# Altium footprint library LimeMicroAltiumLib.PcbLib: 876 footprints (part 35 of 57)
Each footprint in its own frame and in the unit in brackets; x right, y up, seen from the top. Pads: shape width x height; smd on the part's side, far side on the other; paste and mask are expansions set on the pad; w line width, h text height; cw(c..) or ccw(c..) is an arc to the next point about the centre after c.
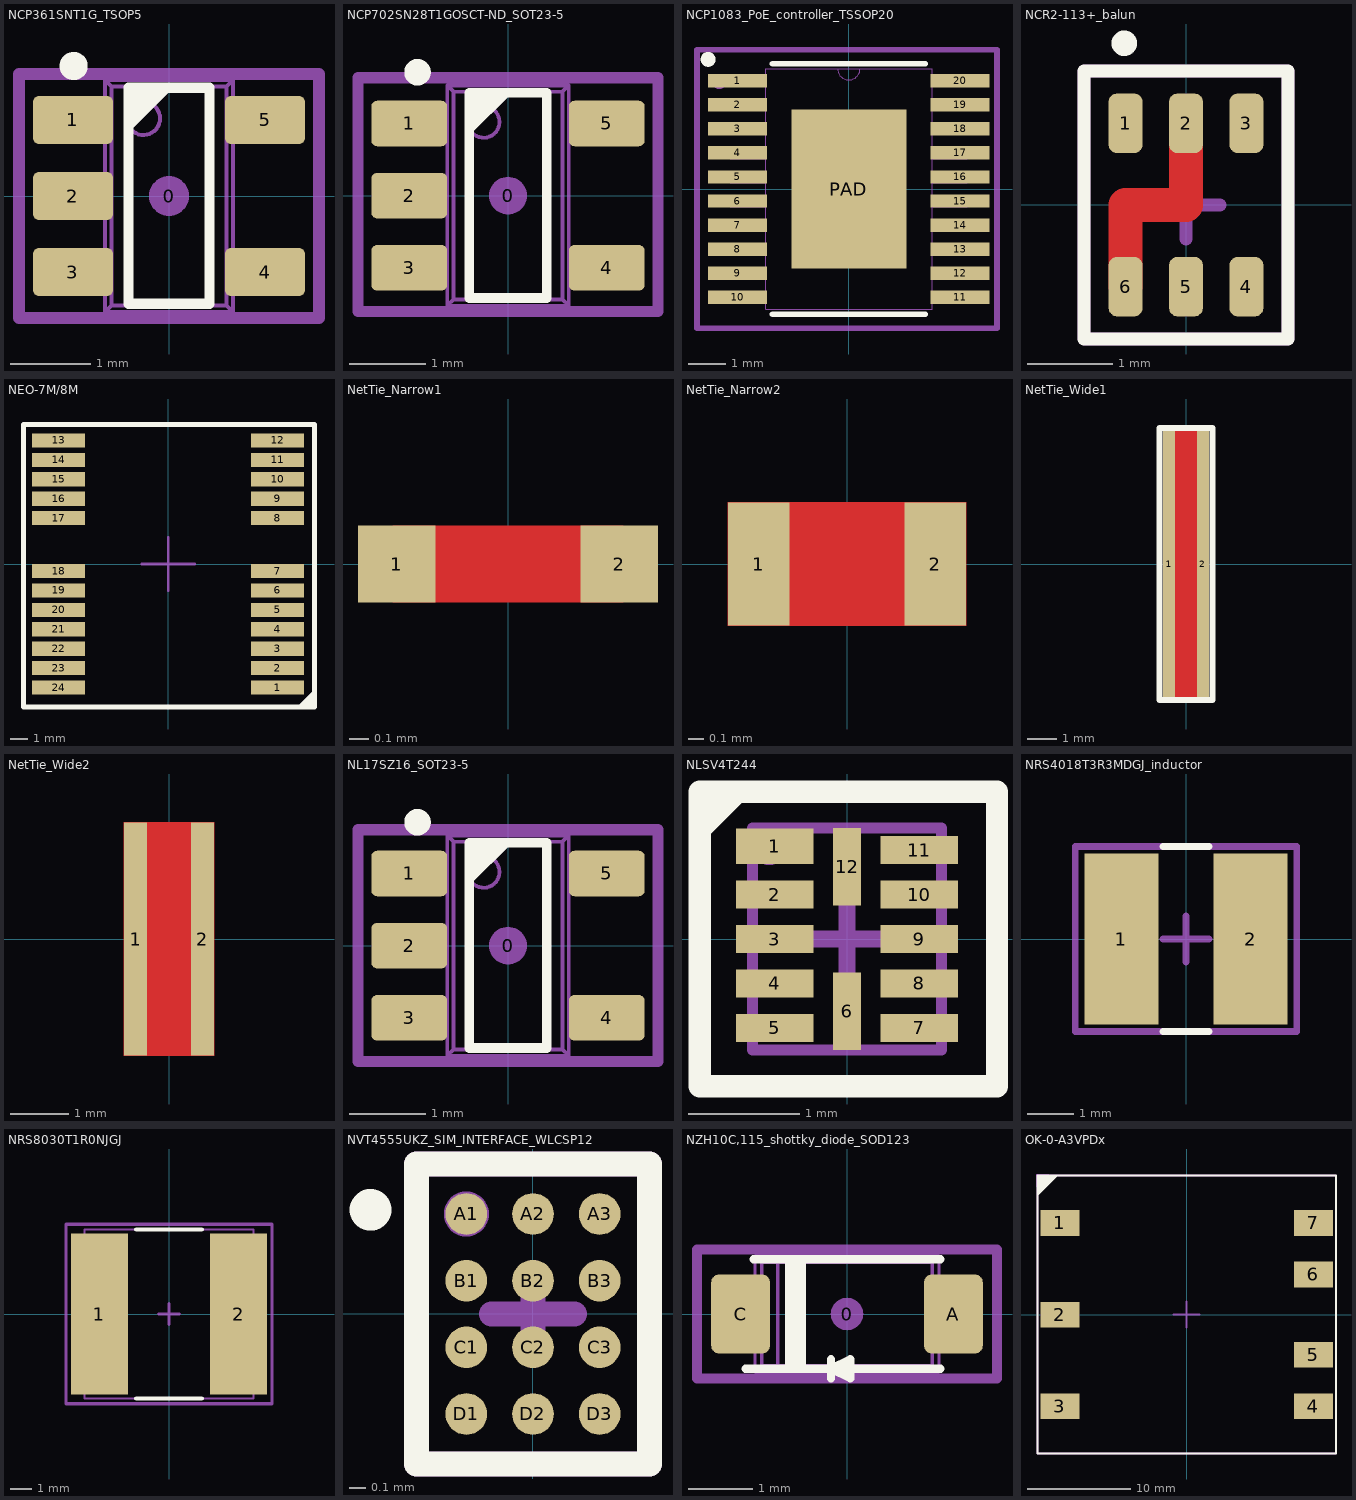
[diagram p34: the footprints below, top view; thin cyan lines are the x and y axes]

## NCP361SNT1G_TSOP5 [mm]
height 1.6
pads (6):
  round 0.5 on Mech15: 0(0,0)
  rrect25% 1x0.6 smd: 1(-1.2,0.95) 2(-1.2,0) 3(-1.2,-0.95) 4(1.2,-0.95) 5(1.2,0.95)
Top Overlay:
  circle w0.2: c-1.191,1.625 r0.075
  region: -0.508,1.353 0.053,1.353 -0.508,0.792
  lines w0.127: -0.508,-1.347 0.508,-1.347 0.508,1.353 -0.508,1.353 -0.508,-1.347
Mechanical 13:
  circle w0.05: c-0.32,0.97 r0.208
  lines w0.05: -1.191,-1.15 -1.191,-0.75 ; -1.191,-0.2 -1.191,0.2 ; -1.191,0.75 -1.191,1.15 ; -1.1,-1.15 -1.1,-0.75 ; -1.1,-0.2 -1.1,0.2 ; -1.1,0.75 -1.1,1.15 ; -1.094,-1.15 -1.094,-0.75 ; -1.094,-0.2 -1.094,0.2 ; -1.094,0.75 -1.094,1.15 ; -0.844,-1.15 -0.844,-0.75 ; -0.844,-0.2 -0.844,0.2 ; -0.844,0.75 -0.844,1.15 ; -0.8,-1.15 -1.4,-1.15 -1.4,-0.75 -0.8,-0.75 ; -0.8,-0.2 -1.4,-0.2 -1.4,0.2 -0.8,0.2 ; -0.8,0.75 -1.4,0.75 -1.4,1.15 -0.8,1.15 ; 0.8,-1.15 1.4,-1.15 1.4,-0.75 0.8,-0.75 ; 0.8,0.75 1.4,0.75 1.4,1.15 0.8,1.15 ; 0.844,-1.15 0.844,-0.75 ; 0.844,0.75 0.844,1.15 ; 1.094,-1.15 1.094,-0.75 ; 1.094,0.75 1.094,1.15 ; 1.1,-1.15 1.1,-0.75 ; 1.1,0.75 1.1,1.15 ; 1.191,-1.15 1.191,-0.75 ; 1.191,0.75 1.191,1.15 ; -0.8,-1.45 0.8,-1.45 ; -0.8,-1.45 -0.719,-1.369 ; -0.8,-1.45 -0.8,1.45 ; -0.8,1.45 0.8,1.45 ; -0.8,1.45 -0.719,1.369 ; -0.719,-1.369 -0.719,1.369 ; -0.719,-1.369 0.719,-1.369 ; -0.719,1.369 0.719,1.369 ; 0.719,-1.369 0.719,1.369 ; 0.719,-1.369 0.8,-1.45 ; 0.719,1.369 0.8,1.45 ; 0.8,-1.45 0.8,1.45
Mechanical 15:
  circle w0.35: c-1.2,0.95 r0.079
  lines w0.15: -1.875,-1.525 1.875,-1.525 1.875,1.525 -1.875,1.525 -1.875,-1.525
  text ".Designator" at 0,0 h0.55
3D body "SOT23-5.STEP": height 1.44, standoff -0.01, extent -1.4,-1.45 1.4,1.45

## NCP702SN28T1GOSCT-ND_SOT23-5 [mm]
height 1.6
pads (6):
  round 0.5 on Mech15: 0(0,0)
  rrect25% 1x0.6 smd: 1(-1.3,0.95) 2(-1.3,0) 3(-1.3,-0.95) 4(1.3,-0.95) 5(1.3,0.95)
Top Overlay:
  circle w0.2: c-1.191,1.625 r0.075
  region: -0.508,1.353 0.053,1.353 -0.508,0.792
  lines w0.127: -0.508,-1.347 -0.508,1.353 0.508,1.353 0.508,-1.347 -0.508,-1.347
Mechanical 13:
  circle w0.05: c-0.32,0.97 r0.208
  lines w0.05: -1.191,-1.15 -1.191,-0.75 ; -1.191,-0.2 -1.191,0.2 ; -1.191,0.75 -1.191,1.15 ; -1.1,-1.15 -1.1,-0.75 ; -1.1,-0.2 -1.1,0.2 ; -1.1,0.75 -1.1,1.15 ; -1.094,-1.15 -1.094,-0.75 ; -1.094,-0.2 -1.094,0.2 ; -1.094,0.75 -1.094,1.15 ; -0.844,-1.15 -0.844,-0.75 ; -0.844,-0.2 -0.844,0.2 ; -0.844,0.75 -0.844,1.15 ; -0.8,-1.15 -1.4,-1.15 -1.4,-0.75 -0.8,-0.75 ; -0.8,-0.2 -1.4,-0.2 -1.4,0.2 -0.8,0.2 ; -0.8,0.75 -1.4,0.75 -1.4,1.15 -0.8,1.15 ; 0.8,-1.15 1.4,-1.15 1.4,-0.75 0.8,-0.75 ; 0.8,0.75 1.4,0.75 1.4,1.15 0.8,1.15 ; 0.844,-1.15 0.844,-0.75 ; 0.844,0.75 0.844,1.15 ; 1.094,-1.15 1.094,-0.75 ; 1.094,0.75 1.094,1.15 ; 1.1,-1.15 1.1,-0.75 ; 1.1,0.75 1.1,1.15 ; 1.191,-1.15 1.191,-0.75 ; 1.191,0.75 1.191,1.15 ; -0.8,-1.45 -0.8,1.45 ; -0.8,-1.45 -0.719,-1.369 ; -0.8,-1.45 0.8,-1.45 ; -0.8,1.45 -0.719,1.369 ; -0.8,1.45 0.8,1.45 ; -0.719,-1.369 0.719,-1.369 ; -0.719,-1.369 -0.719,1.369 ; -0.719,1.369 0.719,1.369 ; 0.719,-1.369 0.8,-1.45 ; 0.719,-1.369 0.719,1.369 ; 0.719,1.369 0.8,1.45 ; 0.8,-1.45 0.8,1.45
Mechanical 15:
  circle w0.35: c-1.375,0.95 r0.025
  lines w0.15: -1.975,-1.525 -1.975,1.55 1.975,1.55 1.975,-1.525 -1.975,-1.525
  text ".Designator" at 0,0 h0.55
3D body "SOT23-5.STEP": height 1.44, standoff -0.01, extent -1.4,-1.45 1.4,1.45

## NCP1083_PoE_controller_TSSOP20 [mm]
pads (21):
  rect 1.6x0.36 smd mask+0.05: 1(-3.004,2.925) 2(-3.004,2.275) 3(-3.004,1.625) 4(-3.004,0.975) 5(-3.004,0.325) 6(-3.004,-0.325) 7(-3.004,-0.975) 8(-3.004,-1.625) 9(-3.004,-2.275) 10(-3.004,-2.925) 11(3.004,-2.925) 12(3.004,-2.275) 13(3.004,-1.625) 14(3.004,-0.975) 15(3.004,-0.325) 16(3.004,0.325) 17(3.004,0.975) 18(3.004,1.625) 19(3.004,2.275) 20(3.004,2.925)
  rect 3.1x4.3 smd mask+0.05: PAD(0,0)
Top Overlay:
  circle w0.2: c-3.8,3.5 r0.1
  lines w0.152: -2.061,-3.378 2.061,-3.378 ; -2.061,3.378 2.061,3.378
Mechanical 13:
  lines w0: -0.305,3.251 ccw(c0,3.251) 0.305,3.251
  lines w0.025: -3.2,-3.077 -2.248,-3.077 -2.248,-2.773 -3.2,-2.773 -3.2,-3.077 ; -3.2,-2.427 -2.248,-2.427 -2.248,-2.123 -3.2,-2.123 -3.2,-2.427 ; -3.2,-1.777 -2.248,-1.777 -2.248,-1.473 -3.2,-1.473 -3.2,-1.777 ; -3.2,-1.127 -2.248,-1.127 -2.248,-0.823 -3.2,-0.823 -3.2,-1.127 ; -3.2,-0.477 -2.248,-0.477 -2.248,-0.173 -3.2,-0.173 -3.2,-0.477 ; -3.2,0.173 -2.248,0.173 -2.248,0.477 -3.2,0.477 -3.2,0.173 ; -3.2,0.823 -2.248,0.823 -2.248,1.127 -3.2,1.127 -3.2,0.823 ; -3.2,1.473 -2.248,1.473 -2.248,1.777 -3.2,1.777 -3.2,1.473 ; -3.2,2.123 -2.248,2.123 -2.248,2.427 -3.2,2.427 -3.2,2.123 ; -3.2,2.773 -2.248,2.773 -2.248,3.077 -3.2,3.077 -3.2,2.773 ; -2.248,-3.251 -2.248,3.251 2.248,3.251 2.248,-3.251 -2.248,-3.251 ; 2.248,-3.077 3.2,-3.077 3.2,-2.773 2.248,-2.773 2.248,-3.077 ; 2.248,-2.427 3.2,-2.427 3.2,-2.123 2.248,-2.123 2.248,-2.427 ; 2.248,-1.777 3.2,-1.777 3.2,-1.473 2.248,-1.473 2.248,-1.777 ; 2.248,-1.127 3.2,-1.127 3.2,-0.823 2.248,-0.823 2.248,-1.127 ; 2.248,-0.477 3.2,-0.477 3.2,-0.173 2.248,-0.173 2.248,-0.477 ; 2.248,0.173 3.2,0.173 3.2,0.477 2.248,0.477 2.248,0.173 ; 2.248,0.823 3.2,0.823 3.2,1.127 2.248,1.127 2.248,0.823 ; 2.248,1.473 3.2,1.473 3.2,1.777 2.248,1.777 2.248,1.473 ; 2.248,2.123 3.2,2.123 3.2,2.427 2.248,2.427 2.248,2.123 ; 2.248,2.773 3.2,2.773 3.2,3.077 2.248,3.077 2.248,2.773
Mechanical 15:
  circle w0.2: c-3.5,2.9 r0.1
  lines w0.15: -0.5,0 0.5,0 ; 0,-0.5 0,0.5 ; -4.1,-3.759 4,-3.759 4,3.759 -4.1,3.759 -4.1,-3.759
  text ".Designator" at 0,0 h0.55
3D body "TSSOP20_4P50X6P60_ONS.step": height 1.2, standoff 0, extent -3.2,-3.251 3.2,3.251

## NCR2-113+_balun [mm]
pads (6):
  rrect50% 0.4x0.7 smd mask+0.05: 1(-0.71,0.96) 2(0,0.96) 3(0.71,0.96) 4(0.71,-0.96) 5(0,-0.96) 6(-0.71,-0.96)
Top Layer:
  lines w0.4: -0.71,-0.96 -0.71,0 0,0 0,0.96
Top Overlay:
  circle w0.2: c-0.725,1.9 r0.05
  lines w0.15: -1.2,-1.575 -1.2,1.575 1.2,1.575 1.2,-1.575 -1.2,-1.575
Mechanical 15:
  lines w0.15: -0.4,0 0,0 ; 0,-0.4 0,0 ; 0,0.4 0,0 ; 0.4,0 0,0 ; -1.2,-1.575 -1.2,1.575 1.2,1.575 1.2,-1.575 -1.2,-1.575
  text ".Designator" at 0,0 h0.55
3D body: height 0.9, standoff 0, extent -1,-1.25 1,1.25
3D body: height 0.91, standoff 0, extent -0.775,0.75 -0.575,0.988

## NEO-7M/8M [mm]
pads (24):
  rect 3x0.8 smd: 1(6.2,-7) 2(6.2,-5.9) 3(6.2,-4.8) 4(6.2,-3.7) 5(6.2,-2.6) 6(6.2,-1.5) 7(6.2,-0.4) 8(6.2,2.6) 9(6.2,3.7) 10(6.2,4.8) 11(6.2,5.9) 12(6.2,7) 13(-6.2,7) 14(-6.2,5.9) 15(-6.2,4.8) 16(-6.2,3.7) 17(-6.2,2.6) 18(-6.2,-0.4) 19(-6.2,-1.5) 20(-6.2,-2.6) 21(-6.2,-3.7) 22(-6.2,-4.8) 23(-6.2,-5.9) 24(-6.2,-7)
Top Overlay:
  region: 7.5,-8.1 8.3,-7.3 8.3,-8.1
  lines w0.3: 7.5,-8.1 8.3,-7.3 ; -8.2,-8.1 -8.2,7.9 8.3,7.9 8.3,-8.1 -8.2,-8.1
Mechanical 15:
  circle w0.4: c6.2,-7 r0.1
  lines w0.15: -1.5,0 1.5,0 ; 0,-1.5 0,1.5 ; -8.2,-8.1 -8.2,7.9 8.3,7.9 8.3,-8.1 -8.2,-8.1
  text ".Designator" at 0,0 h0.55
3D body "NEO.STEP": height 2.33, standoff 0, extent -6.1,-8 6.1,8

## NetTie_Narrow1 [mm]
pads (2):
  rect 0.4x0.4 smd: 1(-0.575,0) 2(0.575,0)
Top Layer:
  lines w0.4: -0.575,0 0.575,0

## NetTie_Narrow2 [mm]
pads (2):
  rect 0.4x0.8 smd: 1(-0.575,0) 2(0.575,0)
Top Layer:
  region: -0.775,0.4 -0.775,-0.4 0.775,-0.4 0.775,0.4

## NetTie_Wide1 [mm]
pads (2):
  rect 0.4x9 smd: 1(-0.575,0) 2(0.575,0)
Top Layer:
  region: -0.775,4.5 -0.775,-4.5 0.775,-4.5 0.775,4.5
Top Overlay:
  lines w0.2: -0.9,-4.6 0.9,-4.6 0.9,4.6 -0.9,4.6 -0.9,-4.6

## NetTie_Wide2 [mm]
pads (2):
  rect 0.4x4 smd: 1(-0.575,0) 2(0.575,0)
Top Layer:
  region: -0.775,2 -0.775,-2 0.775,-2 0.775,2

## NL17SZ16_SOT23-5 [mm]
height 1.6
pads (6):
  round 0.5 on Mech15: 0(0,0)
  rrect25% 1x0.6 smd: 1(-1.3,0.95) 2(-1.3,0) 3(-1.3,-0.95) 4(1.3,-0.95) 5(1.3,0.95)
Top Overlay:
  circle w0.2: c-1.191,1.625 r0.075
  region: -0.508,1.353 0.053,1.353 -0.508,0.792
  lines w0.127: -0.508,-1.347 0.508,-1.347 0.508,1.353 -0.508,1.353 -0.508,-1.347
Mechanical 13:
  circle w0.05: c-0.32,0.97 r0.208
  lines w0.05: -1.191,-1.15 -1.191,-0.75 ; -1.191,-0.2 -1.191,0.2 ; -1.191,0.75 -1.191,1.15 ; -1.1,-1.15 -1.1,-0.75 ; -1.1,-0.2 -1.1,0.2 ; -1.1,0.75 -1.1,1.15 ; -1.094,-1.15 -1.094,-0.75 ; -1.094,-0.2 -1.094,0.2 ; -1.094,0.75 -1.094,1.15 ; -0.844,-1.15 -0.844,-0.75 ; -0.844,-0.2 -0.844,0.2 ; -0.844,0.75 -0.844,1.15 ; -0.8,-1.15 -1.4,-1.15 -1.4,-0.75 -0.8,-0.75 ; -0.8,-0.2 -1.4,-0.2 -1.4,0.2 -0.8,0.2 ; -0.8,0.75 -1.4,0.75 -1.4,1.15 -0.8,1.15 ; 0.8,-1.15 1.4,-1.15 1.4,-0.75 0.8,-0.75 ; 0.8,0.75 1.4,0.75 1.4,1.15 0.8,1.15 ; 0.844,-1.15 0.844,-0.75 ; 0.844,0.75 0.844,1.15 ; 1.094,-1.15 1.094,-0.75 ; 1.094,0.75 1.094,1.15 ; 1.1,-1.15 1.1,-0.75 ; 1.1,0.75 1.1,1.15 ; 1.191,-1.15 1.191,-0.75 ; 1.191,0.75 1.191,1.15 ; -0.8,-1.45 0.8,-1.45 ; -0.8,-1.45 -0.719,-1.369 ; -0.8,-1.45 -0.8,1.45 ; -0.8,1.45 0.8,1.45 ; -0.8,1.45 -0.719,1.369 ; -0.719,-1.369 -0.719,1.369 ; -0.719,-1.369 0.719,-1.369 ; -0.719,1.369 0.719,1.369 ; 0.719,-1.369 0.719,1.369 ; 0.719,-1.369 0.8,-1.45 ; 0.719,1.369 0.8,1.45 ; 0.8,-1.45 0.8,1.45
Mechanical 15:
  circle w0.35: c-1.3,0.875 r0.025
  lines w0.15: -1.975,-1.525 1.975,-1.525 1.975,1.525 -1.975,1.525 -1.975,-1.525
  text ".Designator" at 0,0 h0.55
3D body "SOT23-5.STEP": height 1.44, standoff -0.01, extent -1.4,-1.45 1.4,1.45

## NLSV4T244 [mm] "PQFN, 12-Leads, Body 1,70x2,00mm, Pitch 0,40mm, IPC Medium Density"
height 0.55
pads (12):
  rect 0.7x0.32 smd mask+0.05: 1(-0.65,0.835)
  rect 0.7x0.25 smd mask+0.05: 2(-0.65,0.4) 3(-0.65,0) 4(-0.65,-0.4) 5(-0.65,-0.8) 7(0.65,-0.8) 8(0.65,-0.4) 9(0.65,0) 10(0.65,0.4) 11(0.65,0.8)
  rect 0.25x0.7 smd mask+0.05: 6(0,-0.65) 12(0,0.65)
Top Layer:
  region: -1.35,0.875
Top Overlay:
  region: -1.325,0.85 -0.85,1.325 -1.325,1.325
  lines w0.2: -1.325,-1.325 1.35,-1.325 1.35,1.325 -1.325,1.325 -1.325,-1.325
Mechanical 13:
  lines w0.1: -0.85,-1 0.85,-1 0.85,1 -0.85,1 -0.85,-1
Mechanical 15:
  circle w0.2: c-0.7,0.8 r0.035
  lines w0.15: -0.5,0 0.5,0 ; 0,-0.5 0,0.5 ; -1.325,-1.325 1.35,-1.325 1.35,1.325 -1.325,1.325 -1.325,-1.325
  text ".Designator" at 0,0 h0.55
3D body: height 0.55, standoff 0, extent -0.85,-1 0.85,1

## NRS4018T3R3MDGJ_inductor [mm]
pads (2):
  rect 1.6x3.7 smd mask+0.05: 1(-1.4,0) 2(1.4,0)
Top Overlay:
  lines w0.15: -0.5,-2 0.5,-2 ; -0.5,2 0.5,2
Mechanical 15:
  lines w0.15: -0.5,0 0.5,0 ; 0,-0.5 0,0.5 ; -2.4,-2 -2.4,2 2.4,2 2.4,-2 -2.4,-2
  text ".Designator" at 0,0 h0.55
  text "No polarity" at -1.6,-1.7 h0.3
3D body "User Library-nr3015_4x4.STEP": height 1.89, standoff -0.11, extent -2,-1.998 2.001,2.002

## NRS8030T1R0NJGJ [mm] "Precision Wire Wound Inductor, 2-Leads, Body 8,00x8,00mm, IPC Medium Density"
height 3
pads (2):
  rect 2.7x7.6 smd: 1(-3.3,0) 2(3.3,0)
Top Overlay:
  lines w0.2: -1.55,-4 1.55,-4 ; -1.55,4 1.55,4
Mechanical 13:
  lines w0.1: -4,-4 -4,4 4,4 4,-4 -4,-4
Mechanical 15:
  lines w0.15: -0.5,0 0.5,0 ; 0,-0.5 0,0.5 ; -4.875,-4.25 -4.875,4.25 4.875,4.25 4.875,-4.25 -4.875,-4.25
  text ".Designator" at 0,0 h0.55
3D body: height 3, standoff 0, extent -4,-4 4,4

## NVT4555UKZ_SIM_INTERFACE_WLCSP12 [mm]
pads (12):
  round 0.25 smd mask+0.025: A1(-0.4,0.6) A2(0,0.6) A3(0.4,0.6) B1(-0.4,0.2) B2(0,0.2) B3(0.4,0.2) C1(-0.4,-0.2) C2(0,-0.2) C3(0.4,-0.2) D1(-0.4,-0.6) D2(0,-0.6) D3(0.4,-0.6)
Top Overlay:
  circle w0.2: c-0.975,0.625 r0.025
  lines w0.15: -0.7,-0.9 -0.7,0.9 0.7,0.9 0.7,-0.9 -0.7,-0.9
Mechanical 15:
  circle w0.2: c-0.4,0.6 r0.035
  lines w0.15: -0.25,0 0,0 ; 0,-0.25 0,0 ; 0,0.25 0,0 ; 0.25,0 0,0 ; -0.7,-0.9 0.7,-0.9 0.7,0.9 -0.7,0.9 -0.7,-0.9
  text ".Designator" at 0,0 h0.55
3D body: height 0.6, standoff 0, extent -0.6,-0.8 0.6,0.8

## NZH10C,115_shottky_diode_SOD123 [mm]
height 1.15
pads (3):
  round 0.508 on Mech15: 0(0,0)
  rrect25% 0.91x1.22 smd: A(1.65,0) C(-1.65,0)
Top Overlay:
  lines w0.127: -1.575,-0.85 1.448,-0.85 ; -1.45,0.85 1.45,0.85 ; -0.9,-0.85 -0.9,0.85 ; -0.8,-0.85 -0.8,0.85 ; -0.7,-0.85 -0.7,0.85 ; -0.25,-1 -0.25,-0.7 ; 0.05,-0.85 -0.25,-0.85 ; -0.25,-0.85 0.05,-0.7 0.05,-1 -0.25,-0.85
Mechanical 13:
  lines w0.05: -1.766,-0.308 -1.766,0.308 ; -1.707,-0.308 -1.707,0.308 ; -1.517,-0.308 -1.517,0.308 ; -1.425,-0.308 -1.95,-0.308 -1.95,0.308 -1.425,0.308 ; 0.075,-0.9 0.177,-0.798 ; 1.425,-0.308 1.95,-0.308 1.95,0.308 1.425,0.308 ; 1.517,-0.308 1.517,0.308 ; 1.707,-0.308 1.707,0.308 ; 1.766,-0.308 1.766,0.308 ; -1.425,0.9 -1.425,-0.9 1.425,-0.9 ; -1.425,0.9 1.425,0.9 ; -1.425,0.9 -1.323,0.798 ; -1.323,0.798 -1.323,-0.798 -1.072,-0.798 ; -1.323,0.798 -1.072,0.798 ; -1.072,-0.798 -1.072,0.798 ; -1.072,-0.798 1.322,-0.797 ; -1.072,0.798 1.322,0.797 ; 1.322,-0.797 1.425,-0.9 ; 1.322,-0.797 1.322,0.797 ; 1.322,0.797 1.425,0.9 ; 1.425,-0.9 1.425,0.9
Mechanical 15:
  lines w0.15: -2.325,-1 -2.325,1 2.325,1 2.325,-1 -2.325,-1
  text ".Designator" at 0,0 h0.55
  text "C" at -1.9,-0.275 h0.55
  text "A" at 1.475,-0.275 h0.55
3D body "SOD123.STEP": height 1.18, standoff 0, extent -1.95,-0.9 1.95,0.9

## OK-0-A3VPDx [mm]
pads (7):
  rect 3.8x2.5 smd mask+0.05: 1(-12.3,8.9) 2(-12.3,0) 3(-12.3,-8.9) 4(12.3,-8.9) 5(12.3,-3.9) 6(12.3,3.9) 7(12.3,8.9)
Top Overlay:
  region: -14.5,11.5 -12.5,13.5 -14.5,13.5
  lines w0.2: -14.5,-13.5 14.5,-13.5 14.5,13.5 -14.5,13.5 -14.5,-13.5
Mechanical 15:
  region: -14.625,12.375 -13.375,13.625 -14.625,13.625
  lines w0.2: -1.25,0 1.25,0 ; 0,-1.25 0,1.25 ; -14.5,-13.5 -14.5,13.5 14.5,13.5 14.5,-13.5 -14.5,-13.5
  text ".Designator" at 0,0 h0.55
  text "1" at -12.5,8.75 h0.55
  text "3" at -12.5,-9.25 h0.55
  text "4" at 12.25,-9.25 h0.55
  text "7" at 12.25,8.75 h0.55
3D body: height 7.37, standoff 0, extent -13,-13 13,13